# Altium footprint library LCM.PcbLib: 29 footprints (part 2 of 2)
Each footprint in its own frame and in the unit in brackets; x right, y up, seen from the top. Pads: shape width x height; smd on the part's side, far side on the other; paste and mask are expansions set on the pad; w line width, h text height; cw(c..) or ccw(c..) is an arc to the next point about the centre after c.
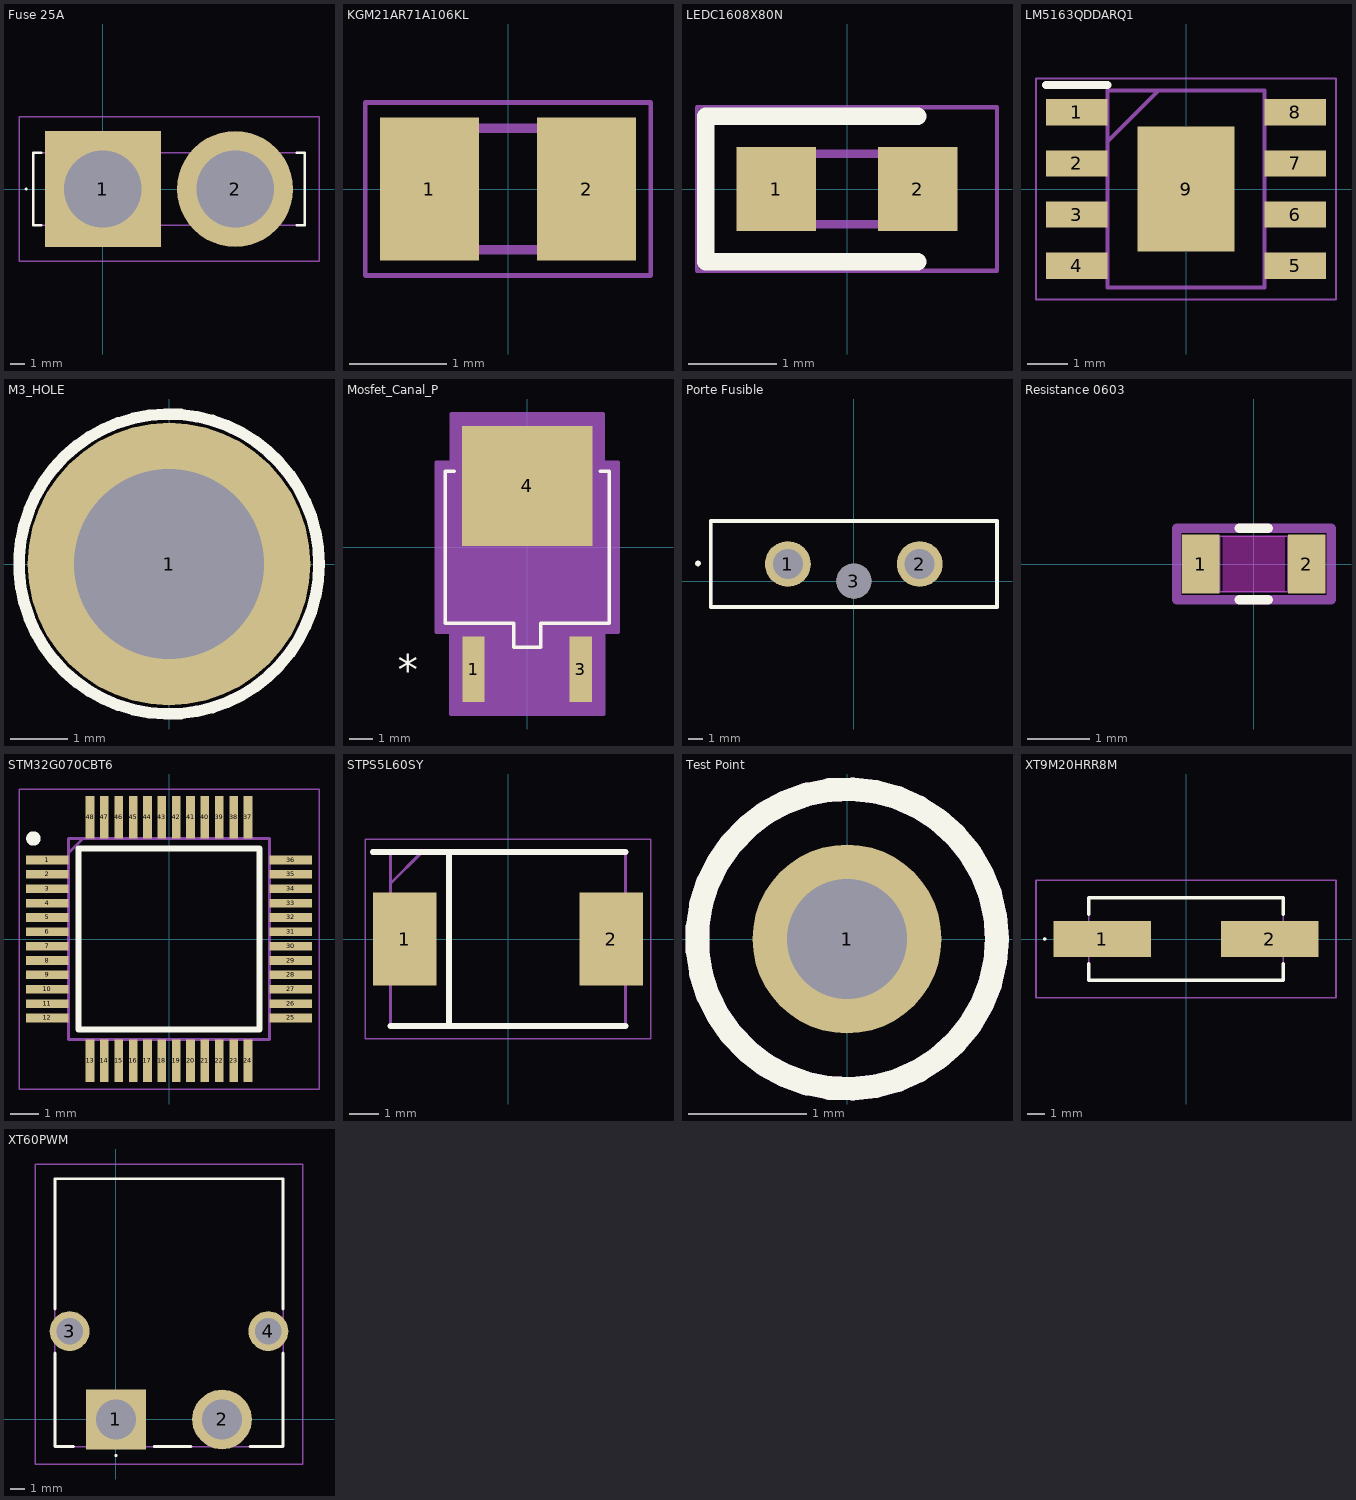
[diagram p1: the footprints below, top view; thin cyan lines are the x and y axes]

## Fuse 25A [mm]
pads (2):
  rect 8.16x8.16 hole 5.44: 1(0,0)
  round 8.16 hole 5.44: 2(9.3,0)
Top Overlay:
  lines w0.1: -5.45,0 ccw(c-5.4,0) -5.35,0 ccw(c-5.4,0) -5.45,0
  lines w0.2: -4.35,-2.55 -4.9,-2.55 -4.9,2.55 -4.35,2.55 ; 13.65,-2.55 14.2,-2.55 14.2,2.55 13.65,2.55
Mechanical 15:
  lines w0.1: -4.9,-2.55 -4.9,2.55 14.2,2.55 14.2,-2.55 -4.9,-2.55
Mechanical 20:
  lines w0.1: -5.9,-5.08 -5.9,5.08 15.2,5.08 15.2,-5.08 -5.9,-5.08
3D body "0287025.PXCN.stp": height 13.72, standoff -5.08, extent -4.724,-2.55 14.376,2.55

## KGM21AR71A106KL [mm] "Capa 10µF, 10VDC, X7R,"
pads (2):
  rect 1.02x1.47 smd: 1(-0.81,0) 2(0.81,0)
Mechanical 15:
  lines w0.1: -1.005,-0.625 -1.005,0.625 1.005,0.625 1.005,-0.625 -1.005,-0.625
Mechanical 20:
  lines w0.05: -1.47,-0.89 -1.47,0.89 1.47,0.89 1.47,-0.89 -1.47,-0.89
3D body "KGM21AR71A106KL.stp": height 1.45, standoff 0, extent -1.005,-0.625 1.005,0.625

## LEDC1608X80N [mm] "LTST-C190KGKT"
pads (2):
  rect 0.9x0.95 smd: 1(-0.8,0) 2(0.8,0)
Top Overlay:
  lines w0.2: 0.8,-0.825 -1.6,-0.825 -1.6,0.825 0.8,0.825
Mechanical 15:
  lines w0.1: -0.8,0.133 -0.533,0.4 ; -0.8,-0.4 -0.8,0.4 0.8,0.4 0.8,-0.4 -0.8,-0.4
Mechanical 20:
  lines w0.05: -1.7,-0.925 -1.7,0.925 1.7,0.925 1.7,-0.925 -1.7,-0.925
3D body "LTST-C190KGKT.stp": height 0.52, standoff -0.28, extent -0.8,-0.4 0.8,0.4

## LM5163QDDARQ1 [mm] "Footprint de LM5163QDDARQ1"
pads (9):
  rect 1.525x0.65 smd: 1(-2.712,1.905) 2(-2.712,0.635) 3(-2.712,-0.635) 4(-2.712,-1.905) 5(2.712,-1.905) 6(2.712,-0.635) 7(2.712,0.635) 8(2.712,1.905)
  rect 2.4x3.1 smd: 9(0,0)
Top Overlay:
  lines w0.2: -3.475,2.58 -1.95,2.58
Mechanical 15:
  lines w0.1: -1.95,1.18 -0.68,2.45 ; -1.95,-2.45 1.95,-2.45 1.95,2.45 -1.95,2.45 -1.95,-2.45
Mechanical 20:
  lines w0.05: -3.725,-2.75 3.725,-2.75 3.725,2.75 -3.725,2.75 -3.725,-2.75
3D body "LM5163QDDARQ1.stp": height 1.57, standoff 0, extent -3,-2.45 3,2.45

## M3_HOLE [mm]
pads (1):
  round 4.9 hole 3.3: 1(0,0)
Top Overlay:
  circle w0.2: c0,0 r2.6

## Mosfet_Canal_P [mil]
pads (3):
  rect 37x110 smd paste+0 mask+0: 1(-89.76,-204.5) 3(89.76,-204.5)
  rect 219x201 smd paste+0 mask+0: 4(0,103)
Top Overlay:
  lines w6: -122.6,127.5 -137.5,127.5 -137.5,-127.5 -22.5,-127.5 -22.5,-167.5 22.5,-167.5 22.5,-127.5 137.5,-127.5 137.5,127.5 122.6,127.5
  text "*" at -217.03,-229.5 h50
Top 3D Body:
  lines w1: -132.5,-122.5 132.5,-122.5 132.5,122.5 -132.5,122.5 -132.5,-122.5 ; -107.26,-237.5 -107.26,-122.5 -72.26,-122.5 -72.26,-237.5 -107.26,-237.5 ; -17.5,-162.5 -17.5,-122.5 17.5,-122.5 17.5,-162.5 -17.5,-162.5 ; 72.26,-237.5 72.26,-122.5 107.26,-122.5 107.26,-237.5 72.26,-237.5
  text "*" at -102.26,-137.5 h50
Mechanical 15:
  region: -152.5,-142.5 -152.5,142.5 -127.5,142.5 -127.5,223.5 127.5,223.5 127.5,142.5 152.5,142.5 152.5,-142.5 128.26,-142.5 128.26,-279.5 -128.26,-279.5 -128.26,-142.5
  lines w6: -152.5,-142.5 -152.5,142.5 -127.5,142.5 -127.5,223.5 127.5,223.5 127.5,142.5 152.5,142.5 152.5,-142.5 128.26,-142.5 128.26,-279.5 -128.26,-279.5 -128.26,-142.5 -152.5,-142.5
3D body "PMOSGSD_TO-252AA_VIS.step": height 94.09, standoff -2.01, extent -132.52,-237.52 132.52,172.52

## Porte Fusible [mm]
pads (3):
  round 3.2 hole 2.1: 1(-4.6,1.2) 2(4.6,1.2)
  round 2.45 hole 2.45 unplated: 3(0,0)
Top Overlay:
  circle w0.254: c-10.879,1.237 r0.07
  lines w0.254: -10,-1.8 -10,4.2 10,4.2 10,-1.8 -10,-1.8
Top 3D Body:
  lines w0.254: -10,-1.8 10,-1.8 10,4.2 -10,4.2 -10,-1.8
3D body "178.6164.0001.stp": height 17.5, standoff -4, extent -9.899,-2.694 10.251,3.306

## Resistance 0603 [mm]
pads (2):
  rect 0.605x0.939 smd paste+0 mask+0: 1(-0.848,0) 2(0.848,0)
Top Layer keep-out:
  region: -0.495,-0.394 -0.495,0.394 0.495,0.394 0.495,-0.394
Top Overlay:
  lines w0.152: -0.229,-0.572 0.229,-0.572 ; -0.229,0.572 0.229,0.572
Keep-Out Layer:
  region: -0.495,-0.445 -0.495,0.445 0.495,0.445 0.495,-0.445
Top 3D Body:
  lines w0.025: -0.851,-0.445 -0.851,0.445 ; -0.851,-0.445 -0.546,-0.445 -0.546,0.445 -0.851,0.445 ; -0.851,-0.445 0.851,-0.445 ; -0.851,-0.445 -0.851,0.445 ; -0.851,0.445 0.851,0.445 ; 0.851,-0.445 0.546,-0.445 0.546,0.445 0.851,0.445 ; 0.851,-0.445 0.851,0.445 ; 0.851,-0.445 0.851,0.445
Mechanical 15:
  lines w0.152: -1.235,-0.572 1.24,-0.572 1.24,0.572 -1.235,0.572 -1.235,-0.572
3D body "RES0603_CPF_TYCO_TYC.step": height 0.56, standoff 0, extent -0.851,-0.444 0.851,0.444

## STM32G070CBT6 [mm]
pads (48):
  rect 1.475x0.3 smd: 1(-4.238,2.75) 2(-4.238,2.25) 3(-4.238,1.75) 4(-4.238,1.25) 5(-4.238,0.75) 6(-4.238,0.25) 7(-4.238,-0.25) 8(-4.238,-0.75) 9(-4.238,-1.25) 10(-4.238,-1.75) 11(-4.238,-2.25) 12(-4.238,-2.75) 25(4.238,-2.75) 26(4.238,-2.25) 27(4.238,-1.75) 28(4.238,-1.25) 29(4.238,-0.75) 30(4.238,-0.25) 31(4.238,0.25) 32(4.238,0.75) 33(4.238,1.25) 34(4.238,1.75) 35(4.238,2.25) 36(4.238,2.75)
  rect 0.3x1.475 smd: 13(-2.75,-4.238) 14(-2.25,-4.238) 15(-1.75,-4.238) 16(-1.25,-4.238) 17(-0.75,-4.238) 18(-0.25,-4.238) 19(0.25,-4.238) 20(0.75,-4.238) 21(1.25,-4.238) 22(1.75,-4.238) 23(2.25,-4.238) 24(2.75,-4.238) 37(2.75,4.238) 38(2.25,4.238) 39(1.75,4.238) 40(1.25,4.238) 41(0.75,4.238) 42(0.25,4.238) 43(-0.25,4.238) 44(-0.75,4.238) 45(-1.25,4.238) 46(-1.75,4.238) 47(-2.25,4.238) 48(-2.75,4.238)
Top Overlay:
  circle w0.25: c-4.725,3.5 r0.125
  lines w0.2: -3.15,-3.15 3.15,-3.15 3.15,3.15 -3.15,3.15 -3.15,-3.15
Mechanical 15:
  lines w0.1: -3.5,3 -3,3.5 ; -3.5,-3.5 3.5,-3.5 3.5,3.5 -3.5,3.5 -3.5,-3.5
Mechanical 20:
  lines w0.05: -5.225,-5.225 5.225,-5.225 5.225,5.225 -5.225,5.225 -5.225,-5.225
3D body "STM32G070CBT6.stp": height 1.6, standoff 0, extent -4.5,-4.5 4.5,4.5

## STPS5L60SY [mm] "Diode Schotky"
pads (2):
  rect 2.15x3.15 smd: 1(-3.5,0) 2(3.5,0)
Top Overlay:
  lines w0.2: -4.575,2.95 3.975,2.95 ; -3.975,-2.95 3.975,-2.95 ; -2,-2.95 -2,2.95
Top 3D Body:
  lines w0.1: -3.975,1.875 -2.9,2.95 ; -3.975,-2.95 3.975,-2.95 3.975,2.95 -3.975,2.95 -3.975,-2.95
Mechanical 15:
  lines w0.05: -4.825,-3.375 4.825,-3.375 4.825,3.375 -4.825,3.375 -4.825,-3.375
3D body "STPS5L60SY.stp": height 2.33, standoff 0.01, extent -4.004,-2.95 4.004,2.95

## Test Point [mm] "Keystone Electronics 5001"
pads (1):
  round 1.6 hole 1.02: 1(0,0)
Top Overlay:
  circle w0.2: c0,0 r1.27
Top 3D Body:
  circle w0.2: c0,0 r1.27
  circle w0.2: c0,0 r1.27
3D body "5001.stp": height 4.94, standoff -2.68, extent -1.261,-1.27 1.261,1.27

## XT9M20HRR8M [mm] "Qartz Crystal 8MHz"
pads (2):
  rect 5.55x2.05 smd: 1(-4.775,0) 2(4.775,0)
Top Overlay:
  lines w0.1: -8.1,0 cw(c-8.05,0) -8,0 cw(c-8.05,0) -8.1,0
  lines w0.2: -5.55,-1.4 -5.55,-2.35 5.55,-2.35 5.55,-1.4 ; -5.55,1.4 -5.55,2.35 5.55,2.35 5.55,1.4
Mechanical 15:
  lines w0.1: -5.55,-2.35 5.55,-2.35 5.55,2.35 -5.55,2.35 -5.55,-2.35
Mechanical 20:
  lines w0.1: -8.55,-3.35 8.55,-3.35 8.55,3.35 -8.55,3.35 -8.55,-3.35
3D body "XT9M20HRR8M.stp": height 4.6, standoff 0, extent -7.345,-2.35 7.345,2.35

## XT60PWM [mm]
pads (4):
  rect 4.05x4.05 hole 2.7: 1(0,0)
  round 4.05 hole 2.7: 2(7.2,0)
  round 2.7 hole 1.8: 3(-3.15,6) 4(10.35,6)
Top Overlay:
  lines w0.1: 0,-2.5 ccw(c0,-2.45) 0,-2.4 ccw(c0,-2.45) 0,-2.5
  lines w0.2: -4.15,4.5 -4.15,-1.85 -2.9,-1.85 ; -4.15,7.5 -4.15,16.35 11.35,16.35 11.35,7.5 ; 2.6,-1.85 5.1,-1.85 ; 9.1,-1.85 11.35,-1.85 11.35,4.5
Top 3D Body:
  lines w0.1: -4.15,-1.85 11.35,-1.85 11.35,16.35 -4.15,16.35 -4.15,-1.85
Mechanical 15:
  lines w0.1: -5.5,-3.025 12.7,-3.025 12.7,17.35 -5.5,17.35 -5.5,-3.025
3D body "XT60PW-M.stp": height 8.61, standoff -2.84, extent -4.35,-1.82 11.55,16.38